# Altium footprint library fmuv5X.PcbLib: 7 footprints
Each footprint in its own frame and in the unit in brackets; x right, y up, seen from the top. Pads: shape width x height; smd on the part's side, far side on the other; paste and mask are expansions set on the pad; w line width, h text height; cw(c..) or ccw(c..) is an arc to the next point about the centre after c.
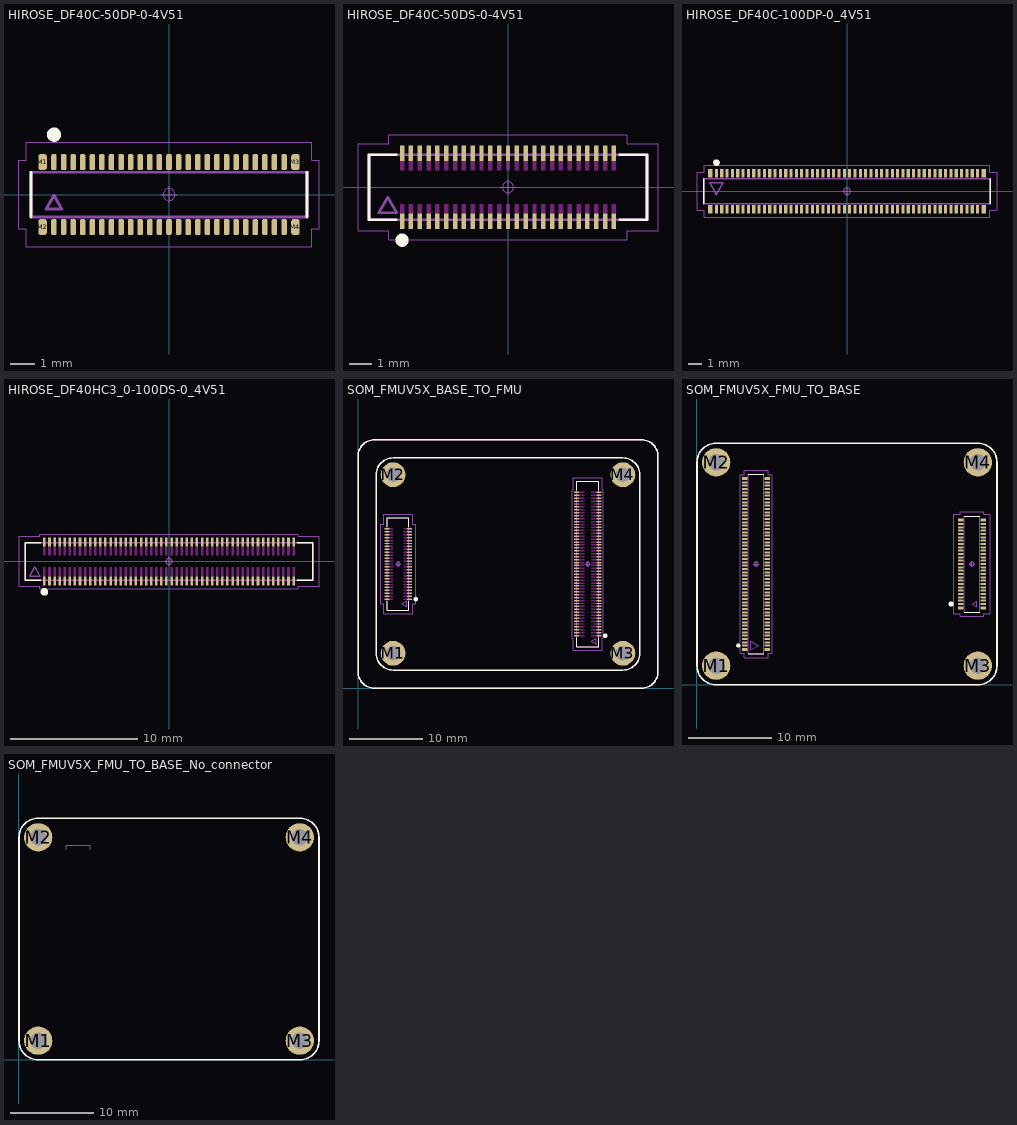
[diagram p0: the footprints below, top view; thin cyan lines are the x and y axes]

## HIROSE_DF40C-50DP-0-4V51 [mm] "Connector, Vertical Board to Board Receptacle; 50 pin, 11.52 mm L X 1.85 mm W X 1.29 mm H body"
height 1.29
pads (54):
  rrect50% 0.23x0.66 smd paste-0.018: 1(-4.8,1.355) 2(-4.8,-1.355) 3(-4.4,1.355) 4(-4.4,-1.355) 5(-4,1.355) 6(-4,-1.355) 7(-3.6,1.355) 8(-3.6,-1.355) 9(-3.2,1.355) 10(-3.2,-1.355) 11(-2.8,1.355) 12(-2.8,-1.355) 13(-2.4,1.355) 14(-2.4,-1.355) 15(-2,1.355) 16(-2,-1.355) 17(-1.6,1.355) 18(-1.6,-1.355) 19(-1.2,1.355) 20(-1.2,-1.355) 21(-0.8,1.355) 22(-0.8,-1.355) 23(-0.4,1.355) 24(-0.4,-1.355) 25(0,1.355) 26(0,-1.355) 27(0.4,1.355) 28(0.4,-1.355) 29(0.8,1.355) 30(0.8,-1.355) 31(1.2,1.355) 32(1.2,-1.355) 33(1.6,1.355) 34(1.6,-1.355) 35(2,1.355) 36(2,-1.355) 37(2.4,1.355) 38(2.4,-1.355) 39(2.8,1.355) 40(2.8,-1.355) 41(3.2,1.355) 42(3.2,-1.355) 43(3.6,1.355) 44(3.6,-1.355) 45(4,1.355) 46(4,-1.355) 47(4.4,1.355) 48(4.4,-1.355) 49(4.8,1.355) 50(4.8,-1.355)
  rrect50% 0.35x0.66 smd paste-0.024: M1(-5.275,1.355) M2(-5.275,-1.355) M3(5.275,1.355) M4(5.275,-1.355)
Top Overlay:
  circle w0.3: c-4.8,2.5 r0.15
  lines w0.12: -5.76,-0.93 -5.76,0.93 ; 5.76,-0.93 5.76,0.93
Top Assembly:
  lines w0.12: -5.76,-0.93 5.76,-0.93 5.76,0.93 -5.76,0.93 -5.76,-0.93 ; -5.13,-0.599 -4.47,-0.599 -4.8,-0.028 -5.13,-0.599
Top Component Outline:
  lines w0.025: -5.76,-0.925 5.76,-0.925 5.76,0.925 -5.76,0.925 -5.76,-0.925
Top Courtyard:
  circle w0.05: c0,0 r0.25
  lines w0.05: -0.35,0 0.35,0 ; 0,-0.35 0,0.35 ; -6.26,-1.43 -6.26,1.43 -5.95,1.43 -5.95,2.185 5.95,2.185 5.95,1.43 6.26,1.43 6.26,-1.43 5.95,-1.43 5.95,-2.185 -5.95,-2.185 -5.95,-1.43 -6.26,-1.43
Top Designator:
  text ".Designator" at 0,0 h1.2
3D body "DF40C-50DP.stp": height 1.13, standoff -0.01, extent -5.75,-1.49 5.77,1.48

## HIROSE_DF40C-50DS-0-4V51 [mm] "Connector, Vertical Board to Board Receptacle; 50 pin, 12.60 mm L X 2.94 mm W X 2.10 mm H body"
height 2.1
pads (50):
  rect 0.2x0.7 smd paste-0.02: 1(-4.8,-1.54) 2(-4.8,1.54) 3(-4.4,-1.54) 4(-4.4,1.54) 5(-4,-1.54) 6(-4,1.54) 7(-3.6,-1.54) 8(-3.6,1.54) 9(-3.2,-1.54) 10(-3.2,1.54) 11(-2.8,-1.54) 12(-2.8,1.54) 13(-2.4,-1.54) 14(-2.4,1.54) 15(-2,-1.54) 16(-2,1.54) 17(-1.6,-1.54) 18(-1.6,1.54) 19(-1.2,-1.54) 20(-1.2,1.54) 21(-0.8,-1.54) 22(-0.8,1.54) 23(-0.4,-1.54) 24(-0.4,1.54) 25(0,-1.54) 26(0,1.54) 27(0.4,-1.54) 28(0.4,1.54) 29(0.8,-1.54) 30(0.8,1.54) 31(1.2,-1.54) 32(1.2,1.54) 33(1.6,-1.54) 34(1.6,1.54) 35(2,-1.54) 36(2,1.54) 37(2.4,-1.54) 38(2.4,1.54) 39(2.8,-1.54) 40(2.8,1.54) 41(3.2,-1.54) 42(3.2,1.54) 43(3.6,-1.54) 44(3.6,1.54) 45(4,-1.54) 46(4,1.54) 47(4.4,-1.54) 48(4.4,1.54) 49(4.8,-1.54) 50(4.8,1.54)
Top Layer keep-out:
  rectangle: 4.7,0.75 4.9,1.19
  rectangle: 4.3,0.75 4.5,1.19
  rectangle: 3.9,0.75 4.1,1.19
  rectangle: 3.5,0.75 3.7,1.19
  rectangle: 3.1,0.75 3.3,1.19
  rectangle: 2.7,0.75 2.9,1.19
  rectangle: 2.3,0.75 2.5,1.19
  rectangle: 1.9,0.75 2.1,1.19
  rectangle: 1.5,0.75 1.7,1.19
  rectangle: 1.1,0.75 1.3,1.19
  rectangle: 0.7,0.75 0.9,1.19
  rectangle: 0.3,0.75 0.5,1.19
  rectangle: -0.1,0.75 0.1,1.19
  rectangle: -0.5,0.75 -0.3,1.19
  rectangle: -0.9,0.75 -0.7,1.19
  rectangle: -1.3,0.75 -1.1,1.19
  rectangle: -1.7,0.75 -1.5,1.19
  rectangle: -2.1,0.75 -1.9,1.19
  rectangle: -2.5,0.75 -2.3,1.19
  rectangle: -2.9,0.75 -2.7,1.19
  rectangle: -3.3,0.75 -3.1,1.19
  rectangle: -3.7,0.75 -3.5,1.19
  rectangle: -4.1,0.75 -3.9,1.19
  rectangle: -4.5,0.75 -4.3,1.19
  rectangle: -4.9,0.75 -4.7,1.19
  rectangle: -0.1,-1.19 0.1,-0.75
  rectangle: 0.3,-1.19 0.5,-0.75
  rectangle: -0.5,-1.19 -0.3,-0.75
  rectangle: 0.7,-1.19 0.9,-0.75
  rectangle: -0.9,-1.19 -0.7,-0.75
  rectangle: 1.1,-1.19 1.3,-0.75
  rectangle: -1.3,-1.19 -1.1,-0.75
  rectangle: 1.9,-1.19 2.1,-0.75
  rectangle: 1.5,-1.19 1.7,-0.75
  rectangle: -1.7,-1.19 -1.5,-0.75
  rectangle: -2.1,-1.19 -1.9,-0.75
  rectangle: -2.5,-1.19 -2.3,-0.75
  rectangle: 2.3,-1.19 2.5,-0.75
  rectangle: 2.7,-1.19 2.9,-0.75
  rectangle: -2.9,-1.19 -2.7,-0.75
  rectangle: -3.3,-1.19 -3.1,-0.75
  rectangle: 3.1,-1.19 3.3,-0.75
  rectangle: 3.5,-1.19 3.7,-0.75
  rectangle: 4.3,-1.19 4.5,-0.75
  rectangle: 3.9,-1.19 4.1,-0.75
  rectangle: -3.7,-1.19 -3.5,-0.75
  rectangle: -4.1,-1.19 -3.9,-0.75
  rectangle: -4.5,-1.19 -4.3,-0.75
  rectangle: 4.7,-1.19 4.9,-0.75
  rectangle: -4.9,-1.19 -4.7,-0.75
Top Overlay:
  circle w0.3: c-4.8,-2.4 r0.15
  lines w0.12: -5.08,-1.47 -6.3,-1.47 -6.3,1.47 -5.08,1.47 ; 5.08,-1.47 6.3,-1.47 6.3,1.47 5.08,1.47
Top Assembly:
  lines w0.12: -6.3,-1.47 6.3,-1.47 6.3,1.47 -6.3,1.47 -6.3,-1.47 ; -5.855,-1.156 -5.045,-1.156 -5.45,-0.455 -5.855,-1.156
Top Component Outline:
  lines w0.025: -6.3,-1.47 6.3,-1.47 6.3,1.47 -6.3,1.47 -6.3,-1.47
Top Courtyard:
  circle w0.05: c0,0 r0.25
  lines w0.05: -0.35,0 0.35,0 ; 0,-0.35 0,0.35 ; -6.8,-1.97 -6.8,1.97 -5.4,1.97 -5.4,2.39 5.4,2.39 5.4,1.97 6.8,1.97 6.8,-1.97 5.4,-1.97 5.4,-2.39 -5.4,-2.39 -5.4,-1.97 -6.8,-1.97
Top Designator:
  text ".Designator" at 0,0 h1.2
3D body "DF40HC(3.0)-50DS.stp": height 2.9, standoff 0, extent -6.3,-1.715 6.3,1.665

## HIROSE_DF40C-100DP-0_4V51 [mm] "Connector, Vertical Board to Board Plug; 104 pin, 21.52 mm L X 1.85 mm W X 1.29 mm H body"
height 1.29
pads (104):
  rect 0.23x0.66 smd: 1(-9.8,1.355) 2(-9.8,-1.355) 3(-9.4,1.355) 4(-9.4,-1.355) 5(-9,1.355) 6(-9,-1.355) 7(-8.6,1.355) 8(-8.6,-1.355) 9(-8.2,1.355) 10(-8.2,-1.355) 11(-7.8,1.355) 12(-7.8,-1.355) 13(-7.4,1.355) 14(-7.4,-1.355) 15(-7,1.355) 16(-7,-1.355) 17(-6.6,1.355) 18(-6.6,-1.355) 19(-6.2,1.355) 20(-6.2,-1.355) 21(-5.8,1.355) 22(-5.8,-1.355) 23(-5.4,1.355) 24(-5.4,-1.355) 25(-5,1.355) 26(-5,-1.355) 27(-4.6,1.355) 28(-4.6,-1.355) 29(-4.2,1.355) 30(-4.2,-1.355) 31(-3.8,1.355) 32(-3.8,-1.355) 33(-3.4,1.355) 34(-3.4,-1.355) 35(-3,1.355) 36(-3,-1.355) 37(-2.6,1.355) 38(-2.6,-1.355) 39(-2.2,1.355) 40(-2.2,-1.355) 41(-1.8,1.355) 42(-1.8,-1.355) 43(-1.4,1.355) 44(-1.4,-1.355) 45(-1,1.355) 46(-1,-1.355) 47(-0.6,1.355) 48(-0.6,-1.355) 49(-0.2,1.355) 50(-0.2,-1.355) 51(0.2,1.355) 52(0.2,-1.355) 53(0.6,1.355) 54(0.6,-1.355) 55(1,1.355) 56(1,-1.355) 57(1.4,1.355) 58(1.4,-1.355) 59(1.8,1.355) 60(1.8,-1.355) 61(2.2,1.355) 62(2.2,-1.355) 63(2.6,1.355) 64(2.6,-1.355) 65(3,1.355) 66(3,-1.355) 67(3.4,1.355) 68(3.4,-1.355) 69(3.8,1.355) 70(3.8,-1.355) 71(4.2,1.355) 72(4.2,-1.355) 73(4.6,1.355) 74(4.6,-1.355) 75(5,1.355) 76(5,-1.355) 77(5.4,1.355) 78(5.4,-1.355) 79(5.8,1.355) 80(5.8,-1.355) 81(6.2,1.355) 82(6.2,-1.355) 83(6.6,1.355) 84(6.6,-1.355) 85(7,1.355) 86(7,-1.355) 87(7.4,1.355) 88(7.4,-1.355) 89(7.8,1.355) 90(7.8,-1.355) 91(8.2,1.355) 92(8.2,-1.355) 93(8.6,1.355) 94(8.6,-1.355) 95(9,1.355) 96(9,-1.355) 97(9.4,1.355) 98(9.4,-1.355) 99(9.8,1.355) 100(9.8,-1.355)
  rect 0.35x0.66 smd: M1(-10.275,1.355) M2(-10.275,-1.355) M3(10.275,1.355) M4(10.275,-1.355)
Top Overlay:
  circle w0.25: c-9.8,2.15 r0.125
  lines w0.12: -10.76,-0.93 -10.76,0.93 ; 10.76,-0.93 10.76,0.93
Top Assembly:
  lines w0.12: -10.76,-0.93 10.76,-0.93 10.76,0.93 -10.76,0.93 -10.76,-0.93 ; -10.318,0.641 -9.8,-0.255 -9.283,0.641 -10.318,0.641
Top Component Outline:
  lines w0.025: -10.76,-0.925 10.76,-0.925 10.76,0.925 -10.76,0.925 -10.76,-0.925
Top Courtyard:
  circle w0.05: c0,0 r0.25
  lines w0.05: -0.35,0 0.35,0 ; 0,-0.35 0,0.35 ; -11.26,-1.43 -11.26,1.43 -10.7,1.43 -10.7,1.935 10.7,1.935 10.7,1.43 11.26,1.43 11.26,-1.43 10.7,-1.43 10.7,-1.935 -10.7,-1.935 -10.7,-1.43 -11.26,-1.43
Top Designator:
  text ".Designator" at 0,0 h1.2
3D body "DF40C-100DP.stp": height 1.13, standoff -0.01, extent -10.76,-1.48 10.76,1.49

## HIROSE_DF40HC3_0-100DS-0_4V51 [mm] "Connector, Vertical Board to Board Receptacle; 100 pin, 22.60 mm L X 2.94 mm W X 3.05 mm H body"
height 3.05
pads (100):
  rect 0.2x0.7 smd: 1(-9.8,-1.54) 2(-9.8,1.54) 3(-9.4,-1.54) 4(-9.4,1.54) 5(-9,-1.54) 6(-9,1.54) 7(-8.6,-1.54) 8(-8.6,1.54) 9(-8.2,-1.54) 10(-8.2,1.54) 11(-7.8,-1.54) 12(-7.8,1.54) 13(-7.4,-1.54) 14(-7.4,1.54) 15(-7,-1.54) 16(-7,1.54) 17(-6.6,-1.54) 18(-6.6,1.54) 19(-6.2,-1.54) 20(-6.2,1.54) 21(-5.8,-1.54) 22(-5.8,1.54) 23(-5.4,-1.54) 24(-5.4,1.54) 25(-5,-1.54) 26(-5,1.54) 27(-4.6,-1.54) 28(-4.6,1.54) 29(-4.2,-1.54) 30(-4.2,1.54) 31(-3.8,-1.54) 32(-3.8,1.54) 33(-3.4,-1.54) 34(-3.4,1.54) 35(-3,-1.54) 36(-3,1.54) 37(-2.6,-1.54) 38(-2.6,1.54) 39(-2.2,-1.54) 40(-2.2,1.54) 41(-1.8,-1.54) 42(-1.8,1.54) 43(-1.4,-1.54) 44(-1.4,1.54) 45(-1,-1.54) 46(-1,1.54) 47(-0.6,-1.54) 48(-0.6,1.54) 49(-0.2,-1.54) 50(-0.2,1.54) 51(0.2,-1.54) 52(0.2,1.54) 53(0.6,-1.54) 54(0.6,1.54) 55(1,-1.54) 56(1,1.54) 57(1.4,-1.54) 58(1.4,1.54) 59(1.8,-1.54) 60(1.8,1.54) 61(2.2,-1.54) 62(2.2,1.54) 63(2.6,-1.54) 64(2.6,1.54) 65(3,-1.54) 66(3,1.54) 67(3.4,-1.54) 68(3.4,1.54) 69(3.8,-1.54) 70(3.8,1.54) 71(4.2,-1.54) 72(4.2,1.54) 73(4.6,-1.54) 74(4.6,1.54) 75(5,-1.54) 76(5,1.54) 77(5.4,-1.54) 78(5.4,1.54) 79(5.8,-1.54) 80(5.8,1.54) 81(6.2,-1.54) 82(6.2,1.54) 83(6.6,-1.54) 84(6.6,1.54) 85(7,-1.54) 86(7,1.54) 87(7.4,-1.54) 88(7.4,1.54) 89(7.8,-1.54) 90(7.8,1.54) 91(8.2,-1.54) 92(8.2,1.54) 93(8.6,-1.54) 94(8.6,1.54) 95(9,-1.54) 96(9,1.54) 97(9.4,-1.54) 98(9.4,1.54) 99(9.8,-1.54) 100(9.8,1.54)
Top Layer keep-out:
  rectangle: -9.9,0.46 -9.7,1.19
  rectangle: 9.7,-1.19 9.9,-0.46
  rectangle: 9.7,0.46 9.9,1.19
  rectangle: -9.9,-1.19 -9.7,-0.46
  rectangle: 9.3,0.46 9.5,1.19
  rectangle: -9.5,0.46 -9.3,1.19
  rectangle: -9.5,-1.19 -9.3,-0.46
  rectangle: 9.3,-1.19 9.5,-0.46
  rectangle: 8.9,0.46 9.1,1.19
  rectangle: 8.9,-1.19 9.1,-0.46
  rectangle: -9.1,0.46 -8.9,1.19
  rectangle: -9.1,-1.19 -8.9,-0.46
  rectangle: 8.5,0.46 8.7,1.19
  rectangle: 8.5,-1.19 8.7,-0.46
  rectangle: -8.7,0.46 -8.5,1.19
  rectangle: -8.7,-1.19 -8.5,-0.46
  rectangle: 8.1,0.46 8.3,1.19
  rectangle: 8.1,-1.19 8.3,-0.46
  rectangle: -8.3,0.46 -8.1,1.19
  rectangle: -8.3,-1.19 -8.1,-0.46
  rectangle: 7.7,0.46 7.9,1.19
  rectangle: -7.9,-1.19 -7.7,-0.46
  rectangle: 7.7,-1.19 7.9,-0.46
  rectangle: -7.9,0.46 -7.7,1.19
  rectangle: 7.3,0.46 7.5,1.19
  rectangle: -7.5,0.46 -7.3,1.19
  rectangle: -7.5,-1.19 -7.3,-0.46
  rectangle: 7.3,-1.19 7.5,-0.46
  rectangle: 6.9,0.46 7.1,1.19
  rectangle: -7.1,0.46 -6.9,1.19
  rectangle: -7.1,-1.19 -6.9,-0.46
  rectangle: 6.9,-1.19 7.1,-0.46
  rectangle: 6.5,0.46 6.7,1.19
  rectangle: 6.5,-1.19 6.7,-0.46
  rectangle: -6.7,0.46 -6.5,1.19
  rectangle: -6.7,-1.19 -6.5,-0.46
  rectangle: 6.1,0.46 6.3,1.19
  rectangle: -6.3,0.46 -6.1,1.19
  rectangle: -6.3,-1.19 -6.1,-0.46
  rectangle: 6.1,-1.19 6.3,-0.46
  rectangle: 5.7,0.46 5.9,1.19
  rectangle: 5.7,-1.19 5.9,-0.46
  rectangle: -5.9,0.46 -5.7,1.19
  rectangle: -5.9,-1.19 -5.7,-0.46
  rectangle: 5.3,0.46 5.5,1.19
  rectangle: 5.3,-1.19 5.5,-0.46
  rectangle: -5.5,0.46 -5.3,1.19
  rectangle: -5.5,-1.19 -5.3,-0.46
  rectangle: 4.9,0.46 5.1,1.19
  rectangle: 4.9,-1.19 5.1,-0.46
  rectangle: -5.1,0.46 -4.9,1.19
  rectangle: -5.1,-1.19 -4.9,-0.46
  rectangle: 4.5,0.46 4.7,1.19
  rectangle: 4.5,-1.19 4.7,-0.46
  rectangle: -4.7,0.46 -4.5,1.19
  rectangle: -4.7,-1.19 -4.5,-0.46
  rectangle: 4.1,0.46 4.3,1.19
  rectangle: -4.3,0.46 -4.1,1.19
  rectangle: -4.3,-1.19 -4.1,-0.46
  rectangle: 4.1,-1.19 4.3,-0.46
  rectangle: 3.7,0.46 3.9,1.19
  rectangle: 3.7,-1.19 3.9,-0.46
  rectangle: -3.9,0.46 -3.7,1.19
  rectangle: -3.9,-1.19 -3.7,-0.46
  rectangle: 3.3,0.46 3.5,1.19
  rectangle: 3.3,-1.19 3.5,-0.46
  rectangle: -3.5,-1.19 -3.3,-0.46
  rectangle: -3.5,0.46 -3.3,1.19
  rectangle: 2.9,0.46 3.1,1.19
  rectangle: 2.9,-1.19 3.1,-0.46
  rectangle: -3.1,0.46 -2.9,1.19
  rectangle: -3.1,-1.19 -2.9,-0.46
  rectangle: -2.7,0.46 -2.5,1.19
  rectangle: 2.5,0.46 2.7,1.19
  rectangle: 2.5,-1.19 2.7,-0.46
  rectangle: -2.7,-1.19 -2.5,-0.46
  rectangle: 2.1,0.46 2.3,1.19
  rectangle: 2.1,-1.19 2.3,-0.46
  rectangle: -2.3,0.46 -2.1,1.19
  rectangle: -2.3,-1.19 -2.1,-0.46
  rectangle: 1.7,0.46 1.9,1.19
  rectangle: 1.7,-1.19 1.9,-0.46
  rectangle: -1.9,0.46 -1.7,1.19
  rectangle: -1.9,-1.19 -1.7,-0.46
  rectangle: 1.3,0.46 1.5,1.19
  rectangle: -1.5,0.46 -1.3,1.19
  rectangle: 1.3,-1.19 1.5,-0.46
  rectangle: -1.5,-1.19 -1.3,-0.46
  rectangle: 0.9,0.46 1.1,1.19
  rectangle: -1.1,0.46 -0.9,1.19
  rectangle: -1.1,-1.19 -0.9,-0.46
  rectangle: 0.9,-1.19 1.1,-0.46
  rectangle: 0.5,0.46 0.7,1.19
  rectangle: 0.5,-1.19 0.7,-0.46
  rectangle: -0.7,-1.19 -0.5,-0.46
  rectangle: -0.7,0.46 -0.5,1.19
  rectangle: 0.1,0.46 0.3,1.19
  rectangle: 0.1,-1.19 0.3,-0.46
  rectangle: -0.3,0.46 -0.1,1.19
  rectangle: -0.3,-1.19 -0.1,-0.46
Top Overlay:
  circle w0.3: c-9.8,-2.4 r0.15
  lines w0.12: -10.08,-1.47 -11.3,-1.47 -11.3,1.47 -10.08,1.47 ; 10.08,-1.47 11.3,-1.47 11.3,1.47 10.08,1.47
Top Assembly:
  lines w0.12: -11.3,-1.47 -11.3,1.47 11.3,1.47 11.3,-1.47 -11.3,-1.47 ; -10.955,-1.156 -10.55,-0.455 -10.145,-1.156 -10.955,-1.156
Top Component Outline:
  lines w0.025: -11.3,-1.47 -11.3,1.47 11.3,1.47 11.3,-1.47 -11.3,-1.47
Top Courtyard:
  circle w0.05: c0,0 r0.25
  lines w0.05: -0.35,0 0.35,0 ; 0,-0.35 0,0.35 ; -11.8,-1.97 -10.15,-1.97 -10.15,-2.14 10.15,-2.14 10.15,-1.97 11.8,-1.97 11.8,1.97 10.15,1.97 10.15,2.14 -10.15,2.14 -10.15,1.97 -11.8,1.97 -11.8,-1.97
Top Designator:
  text ".Designator" at 0,0 h1.2
3D body "DF40HC(3.0)-100DS-0.4V.stp": height 2.9, standoff 0, extent -11.305,-1.69 11.295,1.69

## SOM_FMUV5X_BASE_TO_FMU [mm] "Module, SOM, 41 mm L X 34 mm W X 10 mm H body"
height 10
pads (154):
  round 3.4 hole 2: M1(4.8,4.8) M2(4.8,29.2) M3(36.2,4.8) M4(36.2,29.2)
  rect 0.7x0.2 smd: X1_1(32.94,7.2) X1_2(29.86,7.2) X1_3(32.94,7.6) X1_4(29.86,7.6) X1_5(32.94,8) X1_6(29.86,8) X1_7(32.94,8.4) X1_8(29.86,8.4) X1_9(32.94,8.8) X1_10(29.86,8.8) X1_11(32.94,9.2) X1_12(29.86,9.2) X1_13(32.94,9.6) X1_14(29.86,9.6) X1_15(32.94,10) X1_16(29.86,10) X1_17(32.94,10.4) X1_18(29.86,10.4) X1_19(32.94,10.8) X1_20(29.86,10.8) X1_21(32.94,11.2) X1_22(29.86,11.2) X1_23(32.94,11.6) X1_24(29.86,11.6) X1_25(32.94,12) X1_26(29.86,12) X1_27(32.94,12.4) X1_28(29.86,12.4) X1_29(32.94,12.8) X1_30(29.86,12.8) X1_31(32.94,13.2) X1_32(29.86,13.2) X1_33(32.94,13.6) X1_34(29.86,13.6) X1_35(32.94,14) X1_36(29.86,14) X1_37(32.94,14.4) X1_38(29.86,14.4) X1_39(32.94,14.8) X1_40(29.86,14.8) X1_41(32.94,15.2) X1_42(29.86,15.2) X1_43(32.94,15.6) X1_44(29.86,15.6) X1_45(32.94,16) X1_46(29.86,16) X1_47(32.94,16.4) X1_48(29.86,16.4) X1_49(32.94,16.8) X1_50(29.86,16.8) X1_51(32.94,17.2) X1_52(29.86,17.2) X1_53(32.94,17.6) X1_54(29.86,17.6) X1_55(32.94,18) X1_56(29.86,18) X1_57(32.94,18.4) X1_58(29.86,18.4) X1_59(32.94,18.8) X1_60(29.86,18.8) X1_61(32.94,19.2) X1_62(29.86,19.2) X1_63(32.94,19.6) X1_64(29.86,19.6) X1_65(32.94,20) X1_66(29.86,20) X1_67(32.94,20.4) X1_68(29.86,20.4) X1_69(32.94,20.8) X1_70(29.86,20.8) X1_71(32.94,21.2) X1_72(29.86,21.2) X1_73(32.94,21.6) X1_74(29.86,21.6) X1_75(32.94,22) X1_76(29.86,22) X1_77(32.94,22.4) X1_78(29.86,22.4) X1_79(32.94,22.8) X1_80(29.86,22.8) X1_81(32.94,23.2) X1_82(29.86,23.2) X1_83(32.94,23.6) X1_84(29.86,23.6) X1_85(32.94,24) X1_86(29.86,24) X1_87(32.94,24.4) X1_88(29.86,24.4) X1_89(32.94,24.8) X1_90(29.86,24.8) X1_91(32.94,25.2) X1_92(29.86,25.2) X1_93(32.94,25.6) X1_94(29.86,25.6) X1_95(32.94,26) X1_96(29.86,26) X1_97(32.94,26.4) X1_98(29.86,26.4) X1_99(32.94,26.8) X1_100(29.86,26.8)
  rect 0.7x0.2 smd paste-0.02: X2_1(7.04,12.2) X2_2(3.96,12.2) X2_3(7.04,12.6) X2_4(3.96,12.6) X2_5(7.04,13) X2_6(3.96,13) X2_7(7.04,13.4) X2_8(3.96,13.4) X2_9(7.04,13.8) X2_10(3.96,13.8) X2_11(7.04,14.2) X2_12(3.96,14.2) X2_13(7.04,14.6) X2_14(3.96,14.6) X2_15(7.04,15) X2_16(3.96,15) X2_17(7.04,15.4) X2_18(3.96,15.4) X2_19(7.04,15.8) X2_20(3.96,15.8) X2_21(7.04,16.2) X2_22(3.96,16.2) X2_23(7.04,16.6) X2_24(3.96,16.6) X2_25(7.04,17) X2_26(3.96,17) X2_27(7.04,17.4) X2_28(3.96,17.4) X2_29(7.04,17.8) X2_30(3.96,17.8) X2_31(7.04,18.2) X2_32(3.96,18.2) X2_33(7.04,18.6) X2_34(3.96,18.6) X2_35(7.04,19) X2_36(3.96,19) X2_37(7.04,19.4) X2_38(3.96,19.4) X2_39(7.04,19.8) X2_40(3.96,19.8) X2_41(7.04,20.2) X2_42(3.96,20.2) X2_43(7.04,20.6) X2_44(3.96,20.6) X2_45(7.04,21) X2_46(3.96,21) X2_47(7.04,21.4) X2_48(3.96,21.4) X2_49(7.04,21.8) X2_50(3.96,21.8)
Top Layer keep-out:
  region: 30.94,7.1 30.94,7.3 30.21,7.3 30.21,7.1
  region: 32.59,26.7 32.59,26.9 31.86,26.9 31.86,26.7
  region: 30.94,26.7 30.94,26.9 30.21,26.9 30.21,26.7
  region: 32.59,7.1 32.59,7.3 31.86,7.3 31.86,7.1
  region: 30.94,26.3 30.94,26.5 30.21,26.5 30.21,26.3
  region: 30.94,7.5 30.94,7.7 30.21,7.7 30.21,7.5
  region: 32.59,7.5 32.59,7.7 31.86,7.7 31.86,7.5
  region: 32.59,26.3 32.59,26.5 31.86,26.5 31.86,26.3
  region: 30.94,25.9 30.94,26.1 30.21,26.1 30.21,25.9
  region: 32.59,25.9 32.59,26.1 31.86,26.1 31.86,25.9
  region: 30.94,7.9 30.94,8.1 30.21,8.1 30.21,7.9
  region: 32.59,7.9 32.59,8.1 31.86,8.1 31.86,7.9
  region: 30.94,25.5 30.94,25.7 30.21,25.7 30.21,25.5
  region: 32.59,25.5 32.59,25.7 31.86,25.7 31.86,25.5
  region: 30.94,8.3 30.94,8.5 30.21,8.5 30.21,8.3
  region: 32.59,8.3 32.59,8.5 31.86,8.5 31.86,8.3
  region: 30.94,25.1 30.94,25.3 30.21,25.3 30.21,25.1
  region: 32.59,25.1 32.59,25.3 31.86,25.3 31.86,25.1
  region: 30.94,8.7 30.94,8.9 30.21,8.9 30.21,8.7
  region: 32.59,8.7 32.59,8.9 31.86,8.9 31.86,8.7
  region: 30.94,24.7 30.94,24.9 30.21,24.9 30.21,24.7
  region: 32.59,9.1 32.59,9.3 31.86,9.3 31.86,9.1
  region: 32.59,24.7 32.59,24.9 31.86,24.9 31.86,24.7
  region: 30.94,9.1 30.94,9.3 30.21,9.3 30.21,9.1
  region: 30.94,24.3 30.94,24.5 30.21,24.5 30.21,24.3
  region: 30.94,9.5 30.94,9.7 30.21,9.7 30.21,9.5
  region: 32.59,9.5 32.59,9.7 31.86,9.7 31.86,9.5
  region: 32.59,24.3 32.59,24.5 31.86,24.5 31.86,24.3
  region: 30.94,23.9 30.94,24.1 30.21,24.1 30.21,23.9
  region: 30.94,9.9 30.94,10.1 30.21,10.1 30.21,9.9
  region: 32.59,9.9 32.59,10.1 31.86,10.1 31.86,9.9
  region: 32.59,23.9 32.59,24.1 31.86,24.1 31.86,23.9
  region: 30.94,23.5 30.94,23.7 30.21,23.7 30.21,23.5
  region: 32.59,23.5 32.59,23.7 31.86,23.7 31.86,23.5
  region: 30.94,10.3 30.94,10.5 30.21,10.5 30.21,10.3
  region: 32.59,10.3 32.59,10.5 31.86,10.5 31.86,10.3
  region: 30.94,23.1 30.94,23.3 30.21,23.3 30.21,23.1
  region: 30.94,10.7 30.94,10.9 30.21,10.9 30.21,10.7
  region: 32.59,10.7 32.59,10.9 31.86,10.9 31.86,10.7
  region: 32.59,23.1 32.59,23.3 31.86,23.3 31.86,23.1
  region: 30.94,22.7 30.94,22.9 30.21,22.9 30.21,22.7
  region: 32.59,22.7 32.59,22.9 31.86,22.9 31.86,22.7
  region: 30.94,11.1 30.94,11.3 30.21,11.3 30.21,11.1
  region: 32.59,11.1 32.59,11.3 31.86,11.3 31.86,11.1
  region: 30.94,22.3 30.94,22.5 30.21,22.5 30.21,22.3
  region: 32.59,22.3 32.59,22.5 31.86,22.5 31.86,22.3
  region: 30.94,11.5 30.94,11.7 30.21,11.7 30.21,11.5
  region: 32.59,11.5 32.59,11.7 31.86,11.7 31.86,11.5
  region: 30.94,21.9 30.94,22.1 30.21,22.1 30.21,21.9
  region: 32.59,21.9 32.59,22.1 31.86,22.1 31.86,21.9
  region: 30.94,11.9 30.94,12.1 30.21,12.1 30.21,11.9
  region: 32.59,11.9 32.59,12.1 31.86,12.1 31.86,11.9
  region: 30.94,21.5 30.94,21.7 30.21,21.7 30.21,21.5
  region: 32.59,21.5 32.59,21.7 31.86,21.7 31.86,21.5
  region: 30.94,12.3 30.94,12.5 30.21,12.5 30.21,12.3
  region: 32.59,12.3 32.59,12.5 31.86,12.5 31.86,12.3
  region: 30.94,21.1 30.94,21.3 30.21,21.3 30.21,21.1
  region: 30.94,12.7 30.94,12.9 30.21,12.9 30.21,12.7
  region: 32.59,12.7 32.59,12.9 31.86,12.9 31.86,12.7
  region: 32.59,21.1 32.59,21.3 31.86,21.3 31.86,21.1
  region: 30.94,20.7 30.94,20.9 30.21,20.9 30.21,20.7
  region: 32.59,20.7 32.59,20.9 31.86,20.9 31.86,20.7
  region: 30.94,13.1 30.94,13.3 30.21,13.3 30.21,13.1
  region: 32.59,13.1 32.59,13.3 31.86,13.3 31.86,13.1
  region: 30.94,20.3 30.94,20.5 30.21,20.5 30.21,20.3
  region: 32.59,20.3 32.59,20.5 31.86,20.5 31.86,20.3
  region: 32.59,13.5 32.59,13.7 31.86,13.7 31.86,13.5
  region: 30.94,13.5 30.94,13.7 30.21,13.7 30.21,13.5
  region: 30.94,19.9 30.94,20.1 30.21,20.1 30.21,19.9
  region: 32.59,19.9 32.59,20.1 31.86,20.1 31.86,19.9
  region: 30.94,13.9 30.94,14.1 30.21,14.1 30.21,13.9
  region: 32.59,13.9 32.59,14.1 31.86,14.1 31.86,13.9
  region: 30.94,14.3 30.94,14.5 30.21,14.5 30.21,14.3
  region: 30.94,19.5 30.94,19.7 30.21,19.7 30.21,19.5
  region: 32.59,19.5 32.59,19.7 31.86,19.7 31.86,19.5
  region: 32.59,14.3 32.59,14.5 31.86,14.5 31.86,14.3
  region: 30.94,19.1 30.94,19.3 30.21,19.3 30.21,19.1
  region: 32.59,19.1 32.59,19.3 31.86,19.3 31.86,19.1
  region: 30.94,14.7 30.94,14.9 30.21,14.9 30.21,14.7
  region: 32.59,14.7 32.59,14.9 31.86,14.9 31.86,14.7
  region: 30.94,18.7 30.94,18.9 30.21,18.9 30.21,18.7
  region: 32.59,18.7 32.59,18.9 31.86,18.9 31.86,18.7
  region: 30.94,15.1 30.94,15.3 30.21,15.3 30.21,15.1
  region: 32.59,15.1 32.59,15.3 31.86,15.3 31.86,15.1
  region: 30.94,18.3 30.94,18.5 30.21,18.5 30.21,18.3
  region: 30.94,15.5 30.94,15.7 30.21,15.7 30.21,15.5
  region: 32.59,18.3 32.59,18.5 31.86,18.5 31.86,18.3
  region: 32.59,15.5 32.59,15.7 31.86,15.7 31.86,15.5
  region: 30.94,17.9 30.94,18.1 30.21,18.1 30.21,17.9
  region: 30.94,15.9 30.94,16.1 30.21,16.1 30.21,15.9
  region: 32.59,15.9 32.59,16.1 31.86,16.1 31.86,15.9
  region: 32.59,17.9 32.59,18.1 31.86,18.1 31.86,17.9
  region: 30.94,17.5 30.94,17.7 30.21,17.7 30.21,17.5
  region: 32.59,17.5 32.59,17.7 31.86,17.7 31.86,17.5
  region: 32.59,16.3 32.59,16.5 31.86,16.5 31.86,16.3
  region: 30.94,16.3 30.94,16.5 30.21,16.5 30.21,16.3
  region: 30.94,17.1 30.94,17.3 30.21,17.3 30.21,17.1
  region: 32.59,17.1 32.59,17.3 31.86,17.3 31.86,17.1
  region: 30.94,16.7 30.94,16.9 30.21,16.9 30.21,16.7
  region: 32.59,16.7 32.59,16.9 31.86,16.9 31.86,16.7
  region: 6.69,12.1 6.69,12.3 6.25,12.3 6.25,12.1
  region: 6.69,21.7 6.69,21.9 6.25,21.9 6.25,21.7
  region: 6.69,12.5 6.69,12.7 6.25,12.7 6.25,12.5
  region: 6.69,12.9 6.69,13.1 6.25,13.1 6.25,12.9
  region: 6.69,13.3 6.69,13.5 6.25,13.5 6.25,13.3
  region: 6.69,20.9 6.69,21.1 6.25,21.1 6.25,20.9
  region: 6.69,21.3 6.69,21.5 6.25,21.5 6.25,21.3
  region: 6.69,20.5 6.69,20.7 6.25,20.7 6.25,20.5
  region: 6.69,20.1 6.69,20.3 6.25,20.3 6.25,20.1
  region: 6.69,13.7 6.69,13.9 6.25,13.9 6.25,13.7
  region: 6.69,14.1 6.69,14.3 6.25,14.3 6.25,14.1
  region: 6.69,19.7 6.69,19.9 6.25,19.9 6.25,19.7
  region: 6.69,19.3 6.69,19.5 6.25,19.5 6.25,19.3
  region: 6.69,14.5 6.69,14.7 6.25,14.7 6.25,14.5
  region: 6.69,14.9 6.69,15.1 6.25,15.1 6.25,14.9
  region: 6.69,15.3 6.69,15.5 6.25,15.5 6.25,15.3
  region: 6.69,18.5 6.69,18.7 6.25,18.7 6.25,18.5
  region: 6.69,18.9 6.69,19.1 6.25,19.1 6.25,18.9
  region: 6.69,15.7 6.69,15.9 6.25,15.9 6.25,15.7
  region: 6.69,18.1 6.69,18.3 6.25,18.3 6.25,18.1
  region: 6.69,16.1 6.69,16.3 6.25,16.3 6.25,16.1
  region: 6.69,17.7 6.69,17.9 6.25,17.9 6.25,17.7
  region: 6.69,16.5 6.69,16.7 6.25,16.7 6.25,16.5
  region: 6.69,17.3 6.69,17.5 6.25,17.5 6.25,17.3
  region: 6.69,16.9 6.69,17.1 6.25,17.1 6.25,16.9
  region: 4.75,12.1 4.75,12.3 4.31,12.3 4.31,12.1
  region: 4.75,12.5 4.75,12.7 4.31,12.7 4.31,12.5
  region: 4.75,12.9 4.75,13.1 4.31,13.1 4.31,12.9
  region: 4.75,13.3 4.75,13.5 4.31,13.5 4.31,13.3
  region: 4.75,13.7 4.75,13.9 4.31,13.9 4.31,13.7
  region: 4.75,14.1 4.75,14.3 4.31,14.3 4.31,14.1
  region: 4.75,14.5 4.75,14.7 4.31,14.7 4.31,14.5
  region: 4.75,14.9 4.75,15.1 4.31,15.1 4.31,14.9
  region: 4.75,15.3 4.75,15.5 4.31,15.5 4.31,15.3
  region: 4.75,15.7 4.75,15.9 4.31,15.9 4.31,15.7
  region: 4.75,16.1 4.75,16.3 4.31,16.3 4.31,16.1
  region: 4.75,16.5 4.75,16.7 4.31,16.7 4.31,16.5
  region: 4.75,16.9 4.75,17.1 4.31,17.1 4.31,16.9
  region: 4.75,17.3 4.75,17.5 4.31,17.5 4.31,17.3
  region: 4.75,17.7 4.75,17.9 4.31,17.9 4.31,17.7
  region: 4.75,18.1 4.75,18.3 4.31,18.3 4.31,18.1
  region: 4.75,18.5 4.75,18.7 4.31,18.7 4.31,18.5
  region: 4.75,18.9 4.75,19.1 4.31,19.1 4.31,18.9
  region: 4.75,19.3 4.75,19.5 4.31,19.5 4.31,19.3
  region: 4.75,19.7 4.75,19.9 4.31,19.9 4.31,19.7
  region: 4.75,20.1 4.75,20.3 4.31,20.3 4.31,20.1
  region: 4.75,20.5 4.75,20.7 4.31,20.7 4.31,20.5
  region: 4.75,20.9 4.75,21.1 4.31,21.1 4.31,20.9
  region: 4.75,21.3 4.75,21.5 4.31,21.5 4.31,21.3
  region: 4.75,21.7 4.75,21.9 4.31,21.9 4.31,21.7
Top Overlay:
  circle w0.3: c33.8,7.2 r0.15
  circle w0.3: c7.9,12.2 r0.15
  lines w0.12: 4.03,11.92 4.03,10.7 6.97,10.7 6.97,11.92 ; 4.03,22.08 4.03,23.3 6.97,23.3 6.97,22.08 ; 29.93,6.92 29.93,5.7 32.87,5.7 32.87,6.92 ; 29.93,27.08 29.93,28.3 32.87,28.3 32.87,27.08
  lines w0.2: 0,2.3 ccw(c2.3,2.3) 2.3,0 38.7,0 ccw(c38.7,2.3) 41,2.3 41,31.7 ccw(c38.7,31.7) 38.7,34 2.3,34 ccw(c2.3,31.7) 0,31.7 0,2.3 ; 2.5,4.8 ccw(c4.8,4.8) 4.8,2.5 36.2,2.5 ccw(c36.2,4.8) 38.5,4.8 38.5,29.2 ccw(c36.2,29.2) 36.2,31.5 4.8,31.5 ccw(c4.8,29.2) 2.5,29.2 2.5,4.8
Top Assembly:
  lines w0.12: 4.03,10.7 6.97,10.7 6.97,23.3 4.03,23.3 4.03,10.7 ; 5.955,11.55 6.656,11.145 6.656,11.955 5.955,11.55 ; 29.93,5.7 32.87,5.7 32.87,28.3 29.93,28.3 29.93,5.7 ; 31.855,6.45 32.556,6.045 32.556,6.855 31.855,6.45
  lines w0.2: 0,2.3 ccw(c2.3,2.3) 2.3,0 38.7,0 ccw(c38.7,2.3) 41,2.3 41,31.7 ccw(c38.7,31.7) 38.7,34 2.3,34 ccw(c2.3,31.7) 0,31.7 0,2.3
Top Component Outline:
  lines w0.025: 4.03,10.7 6.97,10.7 6.97,23.3 4.03,23.3 4.03,10.7 ; 29.93,5.7 32.87,5.7 32.87,28.3 29.93,28.3 29.93,5.7
Top Courtyard:
  circle w0.05: c31.4,17 r0.25
  circle w0.05: c5.5,17 r0.25
  lines w0.05: 5.15,17 5.85,17 ; 5.5,16.65 5.5,17.35 ; 31.05,17 31.75,17 ; 31.4,16.65 31.4,17.35 ; 3.11,11.6 3.11,22.4 3.53,22.4 3.53,23.8 7.47,23.8 7.47,22.4 7.89,22.4 7.89,11.6 7.47,11.6 7.47,10.2 3.53,10.2 3.53,11.6 3.11,11.6 ; 29.26,6.85 29.26,27.15 29.43,27.15 29.43,28.8 33.37,28.8 33.37,27.15 33.54,27.15 33.54,6.85 33.37,6.85 33.37,5.2 29.43,5.2 29.43,6.85 29.26,6.85
  lines w0.2: 0,2.3 ccw(c2.3,2.3) 2.3,0 38.7,0 ccw(c38.7,2.3) 41,2.3 41,31.7 ccw(c38.7,31.7) 38.7,34 2.3,34 ccw(c2.3,31.7) 0,31.7 0,2.3
Top Designator:
  text ".Designator" at 31.4,17 h1.2
  text ".Designator" at 5.5,17 h1.2
3D body "fmuv5Xfmum_20191015_revRC10.step": height 6.75, standoff 1.07, extent 2.5,2.5 38.5,31.5
3D body "DF40HC(3.0)-100DS-0.4V.stp": height 2.9, standoff 0, extent 29.71,5.695 33.09,28.295
3D body "DF40HC(3.0)-50DS.stp": height 2.9, standoff 0, extent 3.835,10.7 7.215,23.3

## SOM_FMUV5X_FMU_TO_BASE [mm] "SOM Interface to Base, 41 mm L X 34 mm W X 10 mm H body"
height 10
pads (162):
  round 3.4 hole 2: M1(2.3,2.3) M2(2.3,26.7) M3(33.7,2.3) M4(33.7,26.7)
  rect 0.66x0.23 smd: X1_1(5.745,4.7) X1_2(8.455,4.7) X1_3(5.745,5.1) X1_4(8.455,5.1) X1_5(5.745,5.5) X1_6(8.455,5.5) X1_7(5.745,5.9) X1_8(8.455,5.9) X1_9(5.745,6.3) X1_10(8.455,6.3) X1_11(5.745,6.7) X1_12(8.455,6.7) X1_13(5.745,7.1) X1_14(8.455,7.1) X1_15(5.745,7.5) X1_16(8.455,7.5) X1_17(5.745,7.9) X1_18(8.455,7.9) X1_19(5.745,8.3) X1_20(8.455,8.3) X1_21(5.745,8.7) X1_22(8.455,8.7) X1_23(5.745,9.1) X1_24(8.455,9.1) X1_25(5.745,9.5) X1_26(8.455,9.5) X1_27(5.745,9.9) X1_28(8.455,9.9) X1_29(5.745,10.3) X1_30(8.455,10.3) X1_31(5.745,10.7) X1_32(8.455,10.7) X1_33(5.745,11.1) X1_34(8.455,11.1) X1_35(5.745,11.5) X1_36(8.455,11.5) X1_37(5.745,11.9) X1_38(8.455,11.9) X1_39(5.745,12.3) X1_40(8.455,12.3) X1_41(5.745,12.7) X1_42(8.455,12.7) X1_43(5.745,13.1) X1_44(8.455,13.1) X1_45(5.745,13.5) X1_46(8.455,13.5) X1_47(5.745,13.9) X1_48(8.455,13.9) X1_49(5.745,14.3) X1_50(8.455,14.3) X1_51(5.745,14.7) X1_52(8.455,14.7) X1_53(5.745,15.1) X1_54(8.455,15.1) X1_55(5.745,15.5) X1_56(8.455,15.5) X1_57(5.745,15.9) X1_58(8.455,15.9) X1_59(5.745,16.3) X1_60(8.455,16.3) X1_61(5.745,16.7) X1_62(8.455,16.7) X1_63(5.745,17.1) X1_64(8.455,17.1) X1_65(5.745,17.5) X1_66(8.455,17.5) X1_67(5.745,17.9) X1_68(8.455,17.9) X1_69(5.745,18.3) X1_70(8.455,18.3) X1_71(5.745,18.7) X1_72(8.455,18.7) X1_73(5.745,19.1) X1_74(8.455,19.1) X1_75(5.745,19.5) X1_76(8.455,19.5) X1_77(5.745,19.9) X1_78(8.455,19.9) X1_79(5.745,20.3) X1_80(8.455,20.3) X1_81(5.745,20.7) X1_82(8.455,20.7) X1_83(5.745,21.1) X1_84(8.455,21.1) X1_85(5.745,21.5) X1_86(8.455,21.5) X1_87(5.745,21.9) X1_88(8.455,21.9) X1_89(5.745,22.3) X1_90(8.455,22.3) X1_91(5.745,22.7) X1_92(8.455,22.7) X1_93(5.745,23.1) X1_94(8.455,23.1) X1_95(5.745,23.5) X1_96(8.455,23.5) X1_97(5.745,23.9) X1_98(8.455,23.9) X1_99(5.745,24.3) X1_100(8.455,24.3)
  rect 0.66x0.35 smd: X1_M1(5.745,4.225) X1_M2(8.455,4.225) X1_M3(5.745,24.775) X1_M4(8.455,24.775)
  rrect50% 0.66x0.23 smd paste-0.018: X2_1(31.645,9.7) X2_2(34.355,9.7) X2_3(31.645,10.1) X2_4(34.355,10.1) X2_5(31.645,10.5) X2_6(34.355,10.5) X2_7(31.645,10.9) X2_8(34.355,10.9) X2_9(31.645,11.3) X2_10(34.355,11.3) X2_11(31.645,11.7) X2_12(34.355,11.7) X2_13(31.645,12.1) X2_14(34.355,12.1) X2_15(31.645,12.5) X2_16(34.355,12.5) X2_17(31.645,12.9) X2_18(34.355,12.9) X2_19(31.645,13.3) X2_20(34.355,13.3) X2_21(31.645,13.7) X2_22(34.355,13.7) X2_23(31.645,14.1) X2_24(34.355,14.1) X2_25(31.645,14.5) X2_26(34.355,14.5) X2_27(31.645,14.9) X2_28(34.355,14.9) X2_29(31.645,15.3) X2_30(34.355,15.3) X2_31(31.645,15.7) X2_32(34.355,15.7) X2_33(31.645,16.1) X2_34(34.355,16.1) X2_35(31.645,16.5) X2_36(34.355,16.5) X2_37(31.645,16.9) X2_38(34.355,16.9) X2_39(31.645,17.3) X2_40(34.355,17.3) X2_41(31.645,17.7) X2_42(34.355,17.7) X2_43(31.645,18.1) X2_44(34.355,18.1) X2_45(31.645,18.5) X2_46(34.355,18.5) X2_47(31.645,18.9) X2_48(34.355,18.9) X2_49(31.645,19.3) X2_50(34.355,19.3)
  rrect50% 0.66x0.35 smd paste-0.024: X2_M1(31.645,9.225) X2_M2(34.355,9.225) X2_M3(31.645,19.775) X2_M4(34.355,19.775)
Top Overlay:
  circle w0.3: c30.5,9.7 r0.15
  circle w0.25: c4.95,4.7 r0.125
  lines w0.12: 6.17,3.74 8.03,3.74 ; 6.17,25.26 8.03,25.26 ; 32.07,8.74 33.93,8.74 ; 32.07,20.26 33.93,20.26
  lines w0.2: 0,2.3 ccw(c2.3,2.3) 2.3,0 33.7,0 ccw(c33.7,2.3) 36,2.3 36,26.7 ccw(c33.7,26.7) 33.7,29 2.3,29 ccw(c2.3,26.7) 0,26.7 0,2.3
Top Assembly:
  lines w0.12: 6.17,3.74 8.03,3.74 8.03,25.26 6.17,25.26 6.17,3.74 ; 6.459,4.182 6.459,5.217 7.355,4.7 6.459,4.182 ; 32.07,8.74 32.07,20.26 33.93,20.26 33.93,8.74 32.07,8.74 ; 33.028,9.7 33.599,10.03 33.599,9.37 33.028,9.7
Top Component Outline:
  lines w0.025: 6.175,3.74 8.025,3.74 8.025,25.26 6.175,25.26 6.175,3.74 ; 32.075,8.74 32.075,20.26 33.925,20.26 33.925,8.74 32.075,8.74
Top Courtyard:
  circle w0.05: c33,14.5 r0.25
  circle w0.05: c7.1,14.5 r0.25
  lines w0.05: 6.75,14.5 7.45,14.5 ; 7.1,14.15 7.1,14.85 ; 32.65,14.5 33.35,14.5 ; 33,14.15 33,14.85 ; 5.165,3.8 5.165,25.2 5.67,25.2 5.67,25.76 8.53,25.76 8.53,25.2 9.035,25.2 9.035,3.8 8.53,3.8 8.53,3.24 5.67,3.24 5.67,3.8 5.165,3.8 ; 30.815,8.55 31.57,8.55 31.57,8.24 34.43,8.24 34.43,8.55 35.185,8.55 35.185,20.45 34.43,20.45 34.43,20.76 31.57,20.76 31.57,20.45 30.815,20.45 30.815,8.55
Top Designator:
  text ".Designator" at 33,14.5 h1.2
  text ".Designator" at 7.1,14.5 h1.2
3D body "DF40C-50DP.stp": height 1.13, standoff -0.01, extent 31.52,8.75 34.49,20.27
3D body "DF40C-100DP.stp": height 1.13, standoff -0.01, extent 5.61,3.74 8.58,25.26

## SOM_FMUV5X_FMU_TO_BASE_No_connector [mm] "SOM Interface to Base, 41 mm L X 34 mm W X 10 mm H body"
height 10
pads (4):
  round 3.4 hole 2: M1(2.3,2.3) M2(2.3,26.7) M3(33.7,2.3) M4(33.7,26.7)
Top Overlay:
  lines w0.2: 0,2.3 ccw(c2.3,2.3) 2.3,0 33.7,0 ccw(c33.7,2.3) 36,2.3 36,26.7 ccw(c33.7,26.7) 33.7,29 2.3,29 ccw(c2.3,26.7) 0,26.7 0,2.3
Top Courtyard:
  lines w0.05: 5.67,25.2 5.67,25.76 8.53,25.76 8.53,25.2